# Altium footprint library Ezlo.PcbLib: 103 footprints (part 4 of 7)
Each footprint in its own frame and in the unit in brackets; x right, y up, seen from the top. Pads: shape width x height; smd on the part's side, far side on the other; paste and mask are expansions set on the pad; w line width, h text height; cw(c..) or ccw(c..) is an arc to the next point about the centre after c.
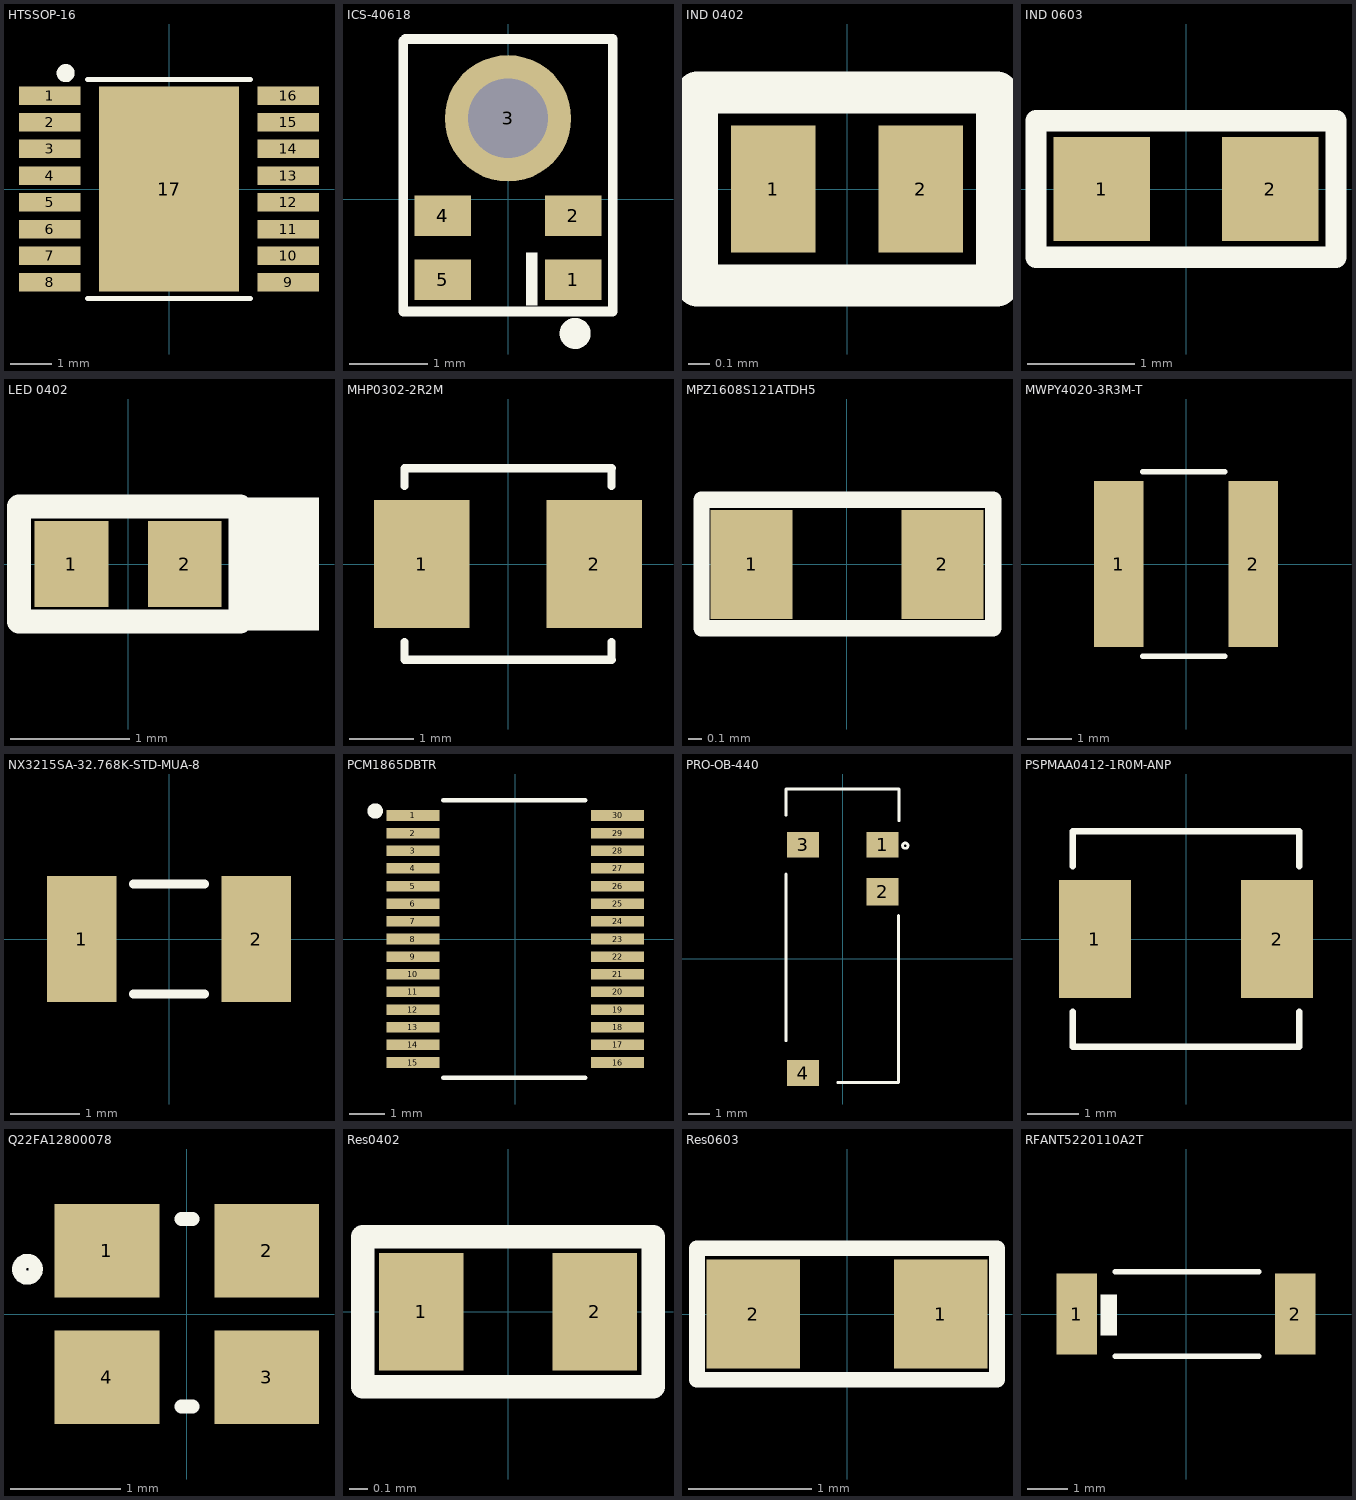
[diagram p3: the footprints below, top view; thin cyan lines are the x and y axes]

## HTSSOP-16 [mm]
pads (17):
  rect 1.5x0.45 smd: 1(-2.9,2.275) 2(-2.9,1.625) 3(-2.9,0.975) 4(-2.9,0.325) 5(-2.9,-0.325) 6(-2.9,-0.975) 7(-2.9,-1.625) 8(-2.9,-2.275) 9(2.9,-2.275) 10(2.9,-1.625) 11(2.9,-0.975) 12(2.9,-0.325) 13(2.9,0.325) 14(2.9,0.975) 15(2.9,1.625) 16(2.9,2.275)
  rect 3.4x5 smd: 17(0,0)
Top Overlay:
  circle w0.254: c-2.515,2.819 r0.092
  lines w0.127: -1.981,-2.667 1.981,-2.667 ; -1.981,2.667 1.981,2.667
3D body "LM43603PWPR.STEP": height 1.2, standoff 0, extent -3.2,-2.5 3.2,2.5

## ICS-40618 [mm] "MICROPHONE MEMS ANALOG OMNI"
pads (6):
  rect 0.725x0.522 smd: 1(0.838,-1.037) 2(0.838,-0.215) 4(-0.837,-0.215) 5(-0.837,-1.037)
  round 1.625 hole 1.025: 3(0,1.037)
  rect 0.625x0.422 smd: 4(-0.837,-0.215)
Top Overlay:
  circle w0.254: c0.864,-1.727 r0.072
  rectangle: 0.229,-1.372 0.381,-0.686
  lines w0.127: -1.346,2.032 -1.346,-1.448 1.346,-1.448 1.346,2.057 -1.321,2.057
3D body "User Library-ICS-40618.STEP": height 0.98, standoff 0, extent -1.324,-1.415 1.326,2.085

## IND 0402 [mm]
pads (2):
  rect 0.4x0.6 smd: 1(-0.35,0) 2(0.35,0)
Top Overlay:
  lines w0.2: -0.711,-0.457 -0.711,0.457 -0.305,0.457 0.711,0.457 0.711,-0.457 -0.305,-0.457 -0.711,-0.457
3D body "User Library-d0402h025.step": height 0.25, standoff 0, extent -0.5,-0.25 0.5,0.25

## IND 0603 [mm]
pads (2):
  rect 0.9x0.97 smd: 1(-0.785,0) 2(0.785,0)
Top Overlay:
  lines w0.2: -1.397,-0.635 -1.397,0.635 1.397,0.635 1.397,-0.635 -1.397,-0.635
3D body "45630.stp": height 0.78, standoff -0.02, extent -0.8,-0.4 0.8,0.4

## LED 0402 [mm]
pads (2):
  rect 0.62x0.72 smd: 1(-0.475,0) 2(0.475,0)
Top Overlay:
  rectangle: 0.94,-0.559 1.6,0.559
  lines w0.2: -0.914,-0.483 0.94,-0.483 0.94,0.483 -0.914,0.483 -0.914,-0.483
3D body "User Library-LED-0402.step": height 0.45, standoff 0, extent -0.505,-0.25 0.505,0.25

## MHP0302-2R2M [mm]
pads (2):
  rect 1.5x2 smd: 1(-1.35,0) 2(1.35,0)
Top Overlay:
  lines w0.127: -1.624,-1.221 -1.624,-1.5 0,-1.5 1.626,-1.5 ; -1.624,1.221 -1.624,1.5 0,1.5 1.626,1.5 ; 1.624,-1.5 1.624,-1.221 ; 1.624,1.221 1.624,1.5
3D body "2201121700_Me-TECH-MHP0302-2R2M_C2934937.STEP": height 1.7, standoff -0.1, extent -1.7,-1.525 1.7,1.475

## MPZ1608S121ATDH5 [mm] "FERRITE BEAD 120 OHM 0603 1LN"
pads (2):
  rect 0.6x0.8 smd: 1(-0.7,0) 2(0.7,0)
Top Overlay:
  lines w0.12: -1.067,-0.468 -1.067,0.475 1.073,0.475 1.073,-0.468 -1.067,-0.468
3D body "742792602.stp": height 0.78, standoff -0.02, extent -0.8,-0.4 0.8,0.4

## MWPY4020-3R3M-T [mm]
pads (2):
  rect 1.1x3.7 smd: 1(-1.5,0) 2(1.5,0)
Top Overlay:
  lines w0.127: -0.965,-2.057 0.864,-2.057 ; -0.965,2.057 0.864,2.057
3D body "srn4018-r82y.stp": height 1.8, standoff 0, extent -2.2,-2 2.2,2

## NX3215SA-32.768K-STD-MUA-8 [mm]
pads (2):
  rect 1x1.8 smd: 1(-1.25,0) 2(1.25,0)
Top Overlay:
  lines w0.127: -0.508,-0.787 0.508,-0.787 ; -0.508,0.787 0.508,0.787
3D body "User Library-NDK_NX3215SA.STEP": height 0.8, standoff 0, extent -1.6,-0.75 1.6,0.75

## PCM1865DBTR [mm]
pads (30):
  rect 1.5x0.3 smd: 1(-2.9,3.5) 2(-2.9,3) 3(-2.9,2.5) 4(-2.9,2) 5(-2.9,1.5) 6(-2.9,1) 7(-2.9,0.5) 8(-2.9,0) 9(-2.9,-0.5) 10(-2.9,-1) 11(-2.9,-1.5) 12(-2.9,-2) 13(-2.9,-2.5) 14(-2.9,-3) 15(-2.9,-3.5) 16(2.9,-3.5) 17(2.9,-3) 18(2.9,-2.5) 19(2.9,-2) 20(2.9,-1.5) 21(2.9,-1) 22(2.9,-0.5) 23(2.9,0) 24(2.9,0.5) 25(2.9,1) 26(2.9,1.5) 27(2.9,2) 28(2.9,2.5) 29(2.9,3) 30(2.9,3.5)
Top Overlay:
  circle w0.254: c-3.967,3.627 r0.092
  lines w0.127: -2.032,-3.937 1.981,-3.937 ; -2.032,3.937 1.981,3.937
3D body "DBT0030A.stp": height 1.13, standoff 0, extent -3.2,-3.9 3.2,3.9

## PRO-OB-440 [mm] "RF ANT 2.4GHZ STAMPED MET SLD"
pads (4):
  rect 1.5x1.2 smd: 1(1.865,5.35) 3(-1.865,5.35) 4(-1.865,-5.35)
  rect 1.5x1.28 smd: 2(1.865,3.15)
Top Overlay:
  circle w0.127: c2.921,5.309 r0.127
  lines w0.127: -2.667,-3.835 -2.667,3.975 ; -2.667,6.731 -2.667,7.963 2.629,7.963 2.629,6.477 ; -0.241,-5.791 2.603,-5.791 2.603,2.032
3D body "PRO-OB-440--3DModel-STEP-1.STEP": height 3.5, standoff -0.03, extent -2.615,-5.744 2.615,8.005

## PSPMAA0412-1R0M-ANP [mm] "IND SMD 1uH"
pads (2):
  rect 1.4x2.3 smd: 1(-1.775,0) 2(1.775,0)
Top Overlay:
  lines w0.127: -2.207,-2.1 -2.207,-1.422 ; -2.207,1.422 -2.207,2.1 ; -2.2,-2.1 0,-2.1 2.2,-2.1 ; -2.2,2.1 0,2.1 2.2,2.1 ; 2.207,-2.1 2.207,-1.422 ; 2.207,1.422 2.207,2.1
3D body "2007311633_PROD-Tech-PSPMAA0412-1R0M-ANP_C705331.STEP": height 1, standoff -0.1, extent -2.2,-2.1 2.2,2.1

## Q22FA12800078 [mm] "37.4MHz SMD Crystal Resonator 9pF 60O ±10ppm -40?~+85? SMD2016-4P Crystals"
pads (4):
  rect 0.95x0.85 smd: 1(-0.725,0.575) 2(0.725,0.575) 3(0.725,-0.575) 4(-0.725,-0.575)
Top Overlay:
  circle w0.127: c-1.448,0.406 r0.076
  lines w0.127: -0.051,-0.838 0.051,-0.838 ; -0.051,0.864 0.051,0.864
3D body "User Library-XRCGB27M000F2P00R0.STEP": height 0.65, standoff 0, extent -1.023,-0.784 0.977,0.816

## Res0402 [mil]
pads (2):
  rect 18x25 smd mask+4: 1(-18.5,0) 2(18.5,0)
Top Overlay:
  lines w0.13: -32,-17 32,-17
  lines w5: -31,-16 31,-16 31,16 -31,16 -31,-16
3D body "User Library-RES_1005-0402.step": height 16.14, standoff 0, extent -22.63,-10.82 22.64,10.83

## Res0603 [mil]
pads (2):
  rect 30x35 smd: 1(30,0) 2(-30,0)
Top Overlay:
  lines w5: -48,-21 -48,21 48,21 48,-21 -48,-21
3D body "User Library-RESC1608X05N.step": height 17.76, standoff 0, extent -30.52,-16.74 30.51,16.73

## RFANT5220110A2T [mm]
pads (2):
  rect 1x2 smd: 1(-2.7,0) 2(2.7,0)
Top Overlay:
  rectangle: -2.108,-0.533 -1.702,0.483
  lines w0.127: -1.753,-1.041 1.803,-1.041 ; -1.753,1.041 1.803,1.041
3D body "RFANT5220110A2T.stp": height 1.3, standoff 0, extent -2.6,-1 2.6,1